# Altium footprint library FootPrintLib_7.PcbLib: 358 footprints (part 16 of 24)
Each footprint in its own frame and in the unit in brackets; x right, y up, seen from the top. Pads: shape width x height; smd on the part's side, far side on the other; paste and mask are expansions set on the pad; w line width, h text height; cw(c..) or ccw(c..) is an arc to the next point about the centre after c.
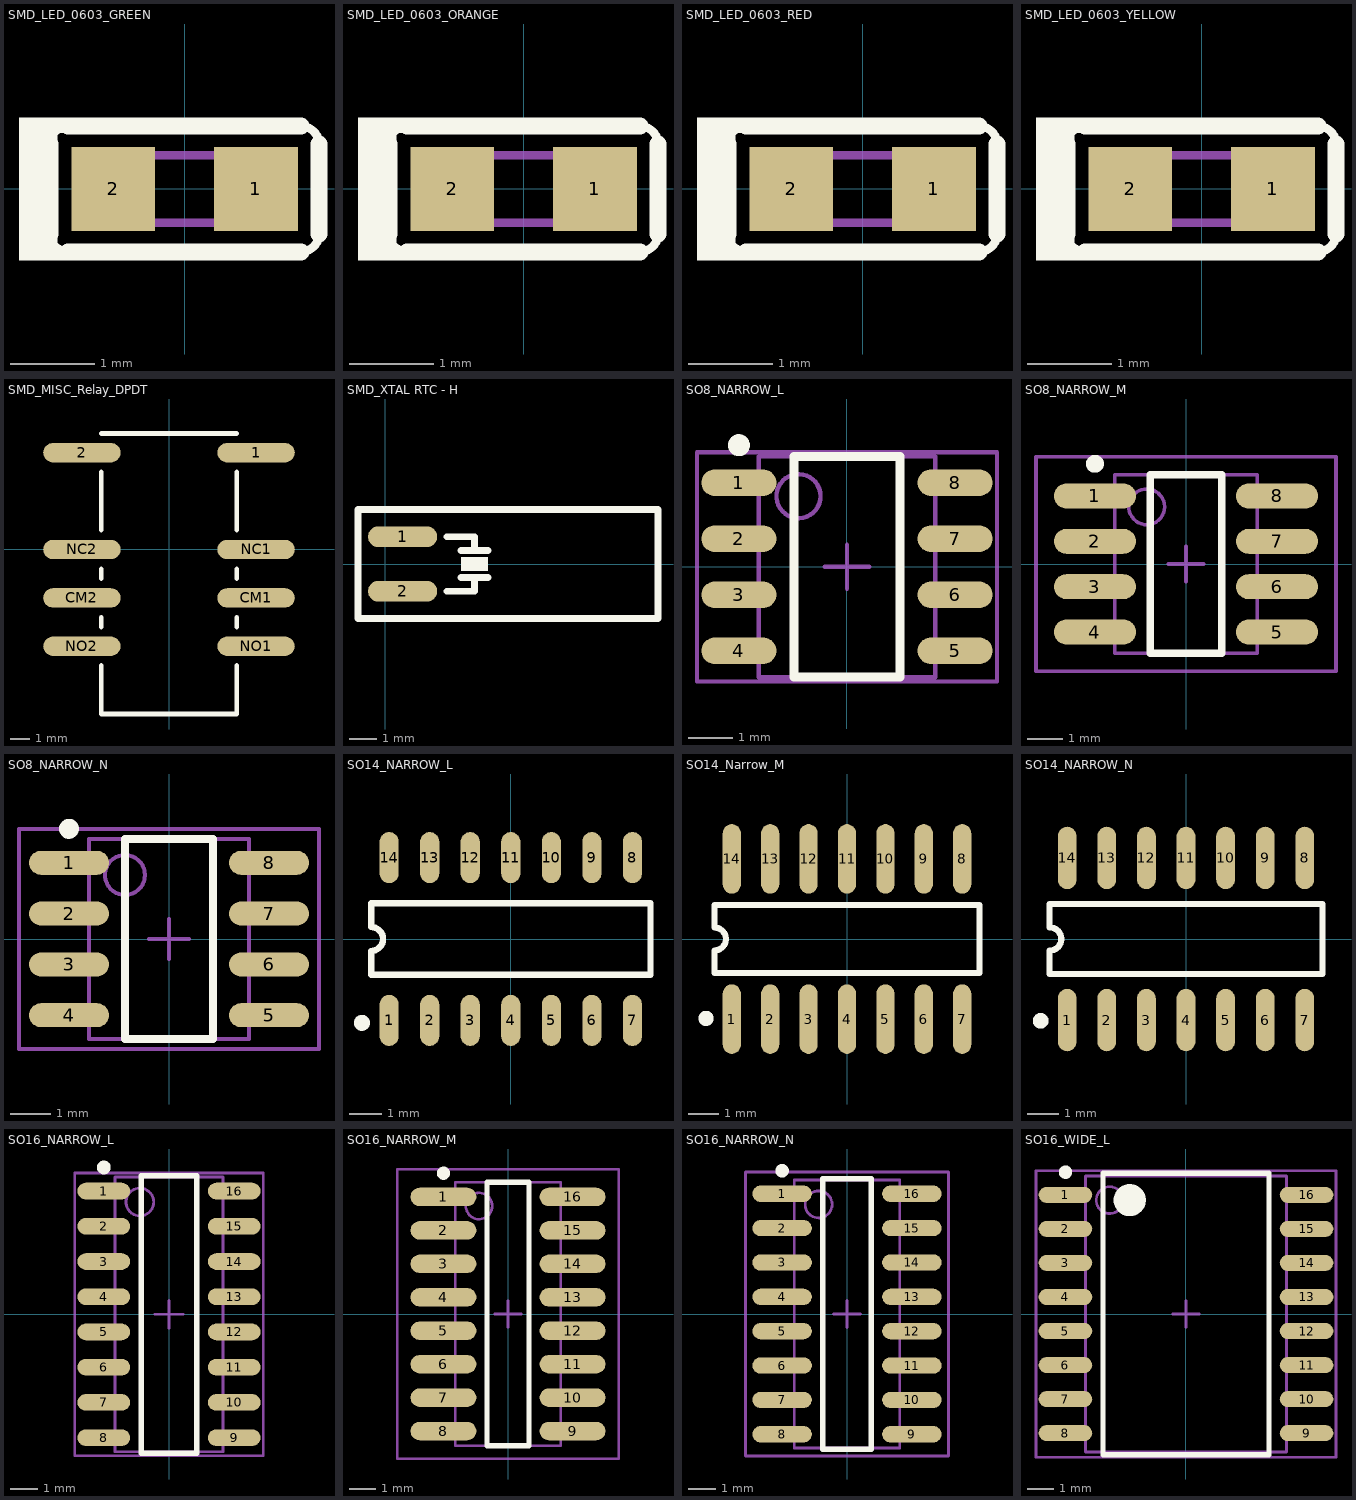
[diagram p15: the footprints below, top view; thin cyan lines are the x and y axes]

## SMD_LED_0603_GREEN [mm]
pads (2):
  rect 1x1 smd paste+0 mask+0: 1(0.85,0) 2(-0.85,0)
Top Overlay:
  rectangle: -1.782,-0.851 -1.198,-0.686
  rectangle: -1.973,-0.851 -1.516,0.851
  rectangle: -1.782,0.665 -1.132,0.851
  lines w0.102: -1.602,-0.533 ccw(c-1.386,-0.533) -1.386,-0.749 ; -1.602,0.533 cw(c-1.386,0.533) -1.386,0.749 ; 1.386,-0.749 ccw(c1.386,-0.533) 1.602,-0.533 ; 1.386,0.749 cw(c1.386,0.533) 1.602,0.533
  lines w0.203: -1.602,-0.533 -1.602,0.533 ; -1.386,-0.749 1.386,-0.749 ; -1.386,0.749 1.386,0.749 ; 1.602,-0.533 1.602,0.533
Mechanical 7:
  lines w0.1: -0.8,-0.4 -0.8,0.4 0.8,0.4 0.8,-0.4 -0.8,-0.4
  text ".Designator" at -1.6,0.6 h0.4
  text ".Comment" at -1.6,-0.9 h0.4
3D body: height 0.46, standoff 0, extent -0.301,-0.464 0.493,0.402
3D body: height 0.38, standoff 0, extent -0.502,-0.533 0.668,0.533
3D body: height 0.38, standoff 0, extent -0.925,-0.535 -0.5,0.535
3D body: height 0.38, standoff 0, extent 0.664,-0.532 1.089,0.532

## SMD_LED_0603_ORANGE [mm]
pads (2):
  rect 1x1 smd paste+0 mask+0: 1(0.85,0) 2(-0.85,0)
Top Overlay:
  rectangle: -1.782,-0.851 -1.198,-0.686
  rectangle: -1.973,-0.851 -1.516,0.851
  rectangle: -1.782,0.665 -1.132,0.851
  lines w0.102: -1.602,-0.533 ccw(c-1.386,-0.533) -1.386,-0.749 ; -1.602,0.533 cw(c-1.386,0.533) -1.386,0.749 ; 1.386,-0.749 ccw(c1.386,-0.533) 1.602,-0.533 ; 1.386,0.749 cw(c1.386,0.533) 1.602,0.533
  lines w0.203: -1.602,-0.533 -1.602,0.533 ; -1.386,-0.749 1.386,-0.749 ; -1.386,0.749 1.386,0.749 ; 1.602,-0.533 1.602,0.533
Mechanical 7:
  lines w0.1: -0.8,-0.4 0.8,-0.4 0.8,0.4 -0.8,0.4 -0.8,-0.4
  text ".Designator" at -1.6,0.6 h0.4
  text ".Comment" at -1.6,-0.9 h0.4
3D body: height 0.38, standoff 0, extent 0.664,-0.532 1.089,0.532
3D body: height 0.38, standoff 0, extent -0.925,-0.535 -0.5,0.535
3D body: height 0.38, standoff 0, extent -0.502,-0.533 0.668,0.533
3D body: height 0.46, standoff 0, extent -0.301,-0.464 0.493,0.402

## SMD_LED_0603_RED [mm]
pads (2):
  rect 1x1 smd paste+0 mask+0: 1(0.85,0) 2(-0.85,0)
Top Overlay:
  rectangle: -1.782,-0.851 -1.198,-0.686
  rectangle: -1.973,-0.851 -1.516,0.851
  rectangle: -1.782,0.665 -1.132,0.851
  lines w0.102: -1.602,-0.533 ccw(c-1.386,-0.533) -1.386,-0.749 ; -1.602,0.533 cw(c-1.386,0.533) -1.386,0.749 ; 1.386,-0.749 ccw(c1.386,-0.533) 1.602,-0.533 ; 1.386,0.749 cw(c1.386,0.533) 1.602,0.533
  lines w0.203: -1.602,-0.533 -1.602,0.533 ; -1.386,-0.749 1.386,-0.749 ; -1.386,0.749 1.386,0.749 ; 1.602,-0.533 1.602,0.533
Mechanical 7:
  lines w0.1: -0.8,-0.4 0.8,-0.4 0.8,0.4 -0.8,0.4 -0.8,-0.4
  text ".Designator" at -1.6,0.6 h0.4
  text ".Comment" at -1.6,-0.9 h0.4
3D body: height 0.38, standoff 0, extent 0.664,-0.532 1.089,0.532
3D body: height 0.38, standoff 0, extent -0.925,-0.535 -0.5,0.535
3D body: height 0.38, standoff 0, extent -0.502,-0.533 0.668,0.533
3D body: height 0.46, standoff 0, extent -0.301,-0.464 0.493,0.402

## SMD_LED_0603_YELLOW [mm]
pads (2):
  rect 1x1 smd paste+0 mask+0: 1(0.85,0) 2(-0.85,0)
Top Overlay:
  rectangle: -1.782,-0.851 -1.198,-0.686
  rectangle: -1.973,-0.851 -1.516,0.851
  rectangle: -1.782,0.665 -1.132,0.851
  lines w0.102: -1.602,-0.533 ccw(c-1.386,-0.533) -1.386,-0.749 ; -1.602,0.533 cw(c-1.386,0.533) -1.386,0.749 ; 1.386,-0.749 ccw(c1.386,-0.533) 1.602,-0.533 ; 1.386,0.749 cw(c1.386,0.533) 1.602,0.533
  lines w0.203: -1.602,-0.533 -1.602,0.533 ; -1.386,-0.749 1.386,-0.749 ; -1.386,0.749 1.386,0.749 ; 1.602,-0.533 1.602,0.533
Mechanical 7:
  lines w0.1: -0.8,-0.4 0.8,-0.4 0.8,0.4 -0.8,0.4 -0.8,-0.4
  text ".Designator" at -1.6,0.6 h0.4
  text ".Comment" at -1.6,-0.9 h0.4
3D body: height 0.38, standoff 0, extent 0.664,-0.532 1.089,0.532
3D body: height 0.38, standoff 0, extent -0.925,-0.535 -0.5,0.535
3D body: height 0.38, standoff 0, extent -0.502,-0.533 0.668,0.533
3D body: height 0.46, standoff 0, extent -0.301,-0.464 0.493,0.402

## SMD_MISC_Relay_DPDT [mm] "AXICOM SMD DPDT Relay. Dimension 7.0 x 14.5 x 9.6 mm"
height 9.6
pads (8):
  oval 4x1 smd: 1(4.5,5) 2(-4.5,5) CM1(4.5,-2.5) CM2(-4.5,-2.5) NC1(4.5,0) NC2(-4.5,0) NO1(4.5,-5) NO2(-4.5,-5)
Top Overlay:
  lines w0.254: -3.5,-6 -3.5,-8.5 3.5,-8.5 3.5,-6 ; -3.5,-4 -3.5,-3.5 ; -3.5,-1.5 -3.5,-1 ; -3.5,1 -3.5,4 ; -3.5,6 3.5,6 ; 3.5,-4 3.5,-3.5 ; 3.5,-1.5 3.5,-1 ; 3.5,1 3.5,4
3D body "SMD Relay.STEP": height 10.81, standoff -0.01, extent -5,-8.6 5,5.85

## SMD_XTAL RTC - H [mm]
pads (2):
  oval 2.54x0.762 smd: 1(0.635,1) 2(0.635,-1)
Top Overlay:
  rectangle: 2.77,-0.25 3.77,0.25
  lines w0.254: 2.27,-1 3.27,-1 3.27,-0.5 ; 2.27,1 3.27,1 3.27,0.5 ; 2.77,-0.5 3.77,-0.5 ; 2.77,0.5 3.77,0.5 ; -1,-2 -1,2 10,2 10,-2 -1,-2
3D body: height 3, standoff 0, extent 2.5,-1.488 9.5,1.5
3D body: height 1.75, standoff 1.25, extent 1.27,-1.249 2.54,-0.751
3D body: height 1.75, standoff 1.25, extent 1.27,0.751 2.54,1.249
3D body: height 1.5, standoff 0.25, extent 1.022,0.751 1.52,1.25
3D body: height 3.25, standoff 0.25, extent 1.022,-1.25 1.52,-0.75
3D body: height 1.75, standoff 1.25, extent 1.023,0.751 1.52,1.249
3D body: height 1.75, standoff 1.25, extent 1.023,-1.249 1.52,-0.751
3D body: height 0.5, standoff 0, extent 0,-1.25 1.27,-0.752
3D body: height 0.5, standoff 0, extent 0,0.75 1.27,1.248
3D body: height 0.5, standoff 0, extent 1.023,-1.25 1.52,-0.752
3D body: height 0.5, standoff 0, extent 1.023,0.75 1.52,1.248

## SO8_NARROW_L [mm] "8-Pin Small Outline Package (SO8), IPC High Density"
height 1.73
pads (8):
  oval 1.7x0.6 smd: 1(-2.45,1.905) 2(-2.45,0.635) 3(-2.45,-0.635) 4(-2.45,-1.905) 5(2.45,-1.905) 6(2.45,-0.635) 7(2.45,0.635) 8(2.45,1.905)
Top Overlay:
  circle w0.25: c-2.45,2.755 r0.125
  lines w0.2: -1.2,-2.5 -1.2,2.5 1.2,2.5 1.2,-2.5 -1.2,-2.5
Mechanical 13:
  circle w0.1: c-1.1,1.6 r0.5
  lines w0.1: -2,-2.5 -2,2.5 2,2.5 2,-2.5 -2,-2.5
Mechanical 15:
  lines w0.1: -0.5,0 0.5,0 ; 0,-0.5 0,0.5 ; -3.4,-2.6 -3.4,2.6 3.4,2.6 3.4,-2.6 -3.4,-2.6
3D body "SO8_narrow.step": height 1.7, standoff 0, extent -3.124,-2.388 3.073,2.438

## SO8_NARROW_M [mm] "8-Pin Small Outline Package (SO8), IPC Low Density"
height 1.73
pads (8):
  oval 2.3x0.7 smd: 1(-2.55,1.905) 2(-2.55,0.635) 3(-2.55,-0.635) 4(-2.55,-1.905) 5(2.55,-1.905) 6(2.55,-0.635) 7(2.55,0.635) 8(2.55,1.905)
Top Overlay:
  circle w0.25: c-2.55,2.805 r0.125
  lines w0.2: -1,-2.5 -1,2.5 1,2.5 1,-2.5 -1,-2.5
Mechanical 13:
  circle w0.1: c-1.1,1.6 r0.5
  lines w0.1: -2,-2.5 -2,2.5 2,2.5 2,-2.5 -2,-2.5
Mechanical 15:
  lines w0.1: -0.5,0 0.5,0 ; 0,-0.5 0,0.5 ; -4.2,-3 -4.2,3 4.2,3 4.2,-3 -4.2,-3
3D body "SO8_narrow.step": height 1.7, standoff 0, extent -3.124,-2.388 3.073,2.438

## SO8_NARROW_N [mm] "8-Pin Small Outline Package (SO8), IPC Medium Density"
height 1.73
pads (8):
  oval 2x0.6 smd: 1(-2.5,1.905) 2(-2.5,0.635) 3(-2.5,-0.635) 4(-2.5,-1.905) 5(2.5,-1.905) 6(2.5,-0.635) 7(2.5,0.635) 8(2.5,1.905)
Top Overlay:
  circle w0.25: c-2.5,2.755 r0.125
  lines w0.2: -1.1,-2.5 1.1,-2.5 1.1,2.5 -1.1,2.5 -1.1,-2.5
Mechanical 13:
  circle w0.1: c-1.1,1.6 r0.5
  lines w0.1: -2,-2.5 2,-2.5 2,2.5 -2,2.5 -2,-2.5
Mechanical 15:
  lines w0.1: -0.5,0 0.5,0 ; 0,-0.5 0,0.5 ; -3.75,-2.75 3.75,-2.75 3.75,2.75 -3.75,2.75 -3.75,-2.75
3D body "SO8_narrow.step": height 1.7, standoff 0, extent -3.124,-2.388 3.073,2.438

## SO14_NARROW_L [mm]
pads (14):
  oval 0.6x1.6 smd: 1(-3.81,-2.55) 2(-2.54,-2.55) 3(-1.27,-2.55) 4(0,-2.55) 5(1.27,-2.55) 6(2.54,-2.55) 7(3.81,-2.55) 8(3.81,2.55) 9(2.54,2.55) 10(1.27,2.55) 11(0,2.55) 12(-1.27,2.55) 13(-2.54,2.55) 14(-3.81,2.55)
Top Overlay:
  circle w0.25: c-4.66,-2.625 r0.125
  lines w0.2: -4.375,-1.125 -4.375,-0.375 ccw(c-4.375,0) -4.375,0.375 -4.375,1.125 4.375,1.125 4.375,-1.125 -4.375,-1.125
3D body "SO14_Narrow.step": height 1.7, standoff 0, extent -4.318,-3.15 4.318,3.048

## SO14_Narrow_M [mm]
pads (14):
  oval 0.6x2.3 smd: 1(-3.81,-2.65) 2(-2.54,-2.65) 3(-1.27,-2.65) 4(0,-2.65) 5(1.27,-2.65) 6(2.54,-2.65) 7(3.81,-2.65) 8(3.81,2.65) 9(2.54,2.65) 10(1.27,2.65) 11(0,2.65) 12(-1.27,2.65) 13(-2.54,2.65) 14(-3.81,2.65)
Top Overlay:
  circle w0.25: c-4.66,-2.625 r0.125
  lines w0.2: -4.375,-1.125 4.375,-1.125 4.375,1.125 -4.375,1.125 -4.375,0.375 cw(c-4.375,0) -4.375,-0.375 -4.375,-1.125
3D body "SO14_Narrow.step": height 1.7, standoff 0, extent -4.318,-3.15 4.318,3.048

## SO14_NARROW_N [mm]
pads (14):
  oval 0.6x2 smd: 1(-3.81,-2.6) 2(-2.54,-2.6) 3(-1.27,-2.6) 4(0,-2.6) 5(1.27,-2.6) 6(2.54,-2.6) 7(3.81,-2.6) 8(3.81,2.6) 9(2.54,2.6) 10(1.27,2.6) 11(0,2.6) 12(-1.27,2.6) 13(-2.54,2.6) 14(-3.81,2.6)
Top Overlay:
  circle w0.25: c-4.66,-2.625 r0.125
  lines w0.2: -4.375,-1.125 -4.375,-0.375 ccw(c-4.375,0) -4.375,0.375 -4.375,1.125 4.375,1.125 4.375,-1.125 -4.375,-1.125
3D body "SO14_Narrow.step": height 1.7, standoff 0, extent -4.318,-3.15 4.318,3.048

## SO16_NARROW_L [mm] "SOIC, 16-Leads, Body 9.9x3.9mm, Pitch 1.27mm, IPC High Density"
height 1.75
pads (16):
  oval 1.9x0.6 smd: 1(-2.35,4.445) 2(-2.35,3.175) 3(-2.35,1.905) 4(-2.35,0.635) 5(-2.35,-0.635) 6(-2.35,-1.905) 7(-2.35,-3.175) 8(-2.35,-4.445) 9(2.35,-4.445) 10(2.35,-3.175) 11(2.35,-1.905) 12(2.35,-0.635) 13(2.35,0.635) 14(2.35,1.905) 15(2.35,3.175) 16(2.35,4.445)
Top Overlay:
  circle w0.25: c-2.35,5.295 r0.125
  lines w0.2: -1,-5 -1,5 1,5 1,-5 -1,-5
Mechanical 13:
  circle w0.1: c-1.05,4.05 r0.5
  lines w0.1: -1.95,-4.95 -1.95,4.95 1.95,4.95 1.95,-4.95 -1.95,-4.95
Mechanical 15:
  lines w0.1: -0.5,0 0.5,0 ; 0,-0.5 0,0.5 ; -3.4,-5.1 -3.4,5.1 3.4,5.1 3.4,-5.1 -3.4,-5.1
3D body "SO16_NARROW.step": height 1.7, standoff 0, extent -3.048,-4.953 3.15,4.953

## SO16_NARROW_M [mm] "SOIC, 16-Leads, Body 9.9x3.9mm, Pitch 1.27mm, IPC Low Density"
height 1.75
pads (16):
  oval 2.5x0.7 smd: 1(-2.45,4.445) 2(-2.45,3.175) 3(-2.45,1.905) 4(-2.45,0.635) 5(-2.45,-0.635) 6(-2.45,-1.905) 7(-2.45,-3.175) 8(-2.45,-4.445) 9(2.45,-4.445) 10(2.45,-3.175) 11(2.45,-1.905) 12(2.45,-0.635) 13(2.45,0.635) 14(2.45,1.905) 15(2.45,3.175) 16(2.45,4.445)
Top Overlay:
  circle w0.25: c-2.45,5.345 r0.125
  lines w0.2: -0.8,-5 0.8,-5 0.8,5 -0.8,5 -0.8,-5
Mechanical 13:
  circle w0.1: c-1.1,4.1 r0.5
  lines w0.1: -2,-5 2,-5 2,5 -2,5 -2,-5
Mechanical 15:
  lines w0.1: -0.5,0 0.5,0 ; 0,-0.5 0,0.5 ; -4.2,-5.5 4.2,-5.5 4.2,5.5 -4.2,5.5 -4.2,-5.5
3D body "SO16_NARROW.step": height 1.7, standoff 0, extent -3.048,-4.953 3.15,4.953

## SO16_NARROW_N [mm] "SOIC, 16-Leads, Body 9.9x3.9mm, Pitch 1.27mm, IPC Medium Density"
height 1.75
pads (16):
  oval 2.2x0.6 smd: 1(-2.4,4.445) 2(-2.4,3.175) 3(-2.4,1.905) 4(-2.4,0.635) 5(-2.4,-0.635) 6(-2.4,-1.905) 7(-2.4,-3.175) 8(-2.4,-4.445) 9(2.4,-4.445) 10(2.4,-3.175) 11(2.4,-1.905) 12(2.4,-0.635) 13(2.4,0.635) 14(2.4,1.905) 15(2.4,3.175) 16(2.4,4.445)
Top Overlay:
  circle w0.25: c-2.4,5.295 r0.125
  lines w0.2: -0.9,-5 -0.9,5 0.9,5 0.9,-5 -0.9,-5
Mechanical 13:
  circle w0.1: c-1.05,4.05 r0.5
  lines w0.1: -1.95,-4.95 -1.95,4.95 1.95,4.95 1.95,-4.95 -1.95,-4.95
Mechanical 15:
  lines w0.1: -0.5,0 0.5,0 ; 0,-0.5 0,0.5 ; -3.75,-5.25 -3.75,5.25 3.75,5.25 3.75,-5.25 -3.75,-5.25
3D body "SO16_NARROW.step": height 1.7, standoff 0, extent -3.048,-4.953 3.15,4.953

## SO16_WIDE_L [mm] "SOIC, 16-Leads, Body 10.3x7.5mm, Pitch 1.27mm, IPC High Density"
height 2.65
pads (16):
  oval 2x0.6 smd: 1(-4.5,4.445) 2(-4.5,3.175) 3(-4.5,1.905) 4(-4.5,0.635) 5(-4.5,-0.635) 6(-4.5,-1.905) 7(-4.5,-3.175) 8(-4.5,-4.445) 9(4.5,-4.445) 10(4.5,-3.175) 11(4.5,-1.905) 12(4.5,-0.635) 13(4.5,0.635) 14(4.5,1.905) 15(4.5,3.175) 16(4.5,4.445)
Top Overlay:
  circle w0.25: c-4.5,5.295 r0.125
  circle w0.6: c-2.1,4.25 r0.3
  lines w0.2: -3.1,-5.25 -3.1,5.25 3.1,5.25 3.1,-5.25 -3.1,-5.25
Mechanical 13:
  circle w0.1: c-2.85,4.25 r0.5
  lines w0.1: -3.75,-5.15 -3.75,5.15 3.75,5.15 3.75,-5.15 -3.75,-5.15
Mechanical 15:
  lines w0.1: -0.5,0 0.5,0 ; 0,-0.5 0,0.5 ; -5.6,-5.35 -5.6,5.35 5.6,5.35 5.6,-5.35 -5.6,-5.35
3D body "SO16_WIDE.step": height 1.7, standoff 0, extent -5.321,-4.953 5.321,4.953